# Altium schematic symbol library Reles.SchLib: 4 symbols
Pins are listed as number, name and electrical type; pins without a type are passive.

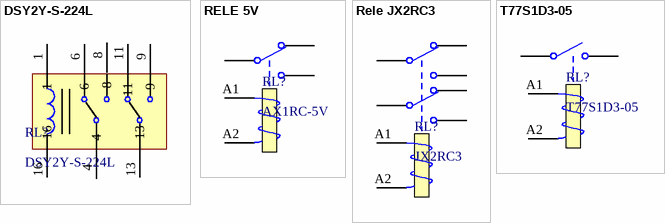
[diagram p0: symbols DSY2Y-S-224L to T77S1D3-05]

## DSY2Y-S-224L
designator RL?
footprint DSY2Y-S-224L (Relé pequeno 24V)
pins: 1, 4, 6, 8, 9, 11, 13, 16

## RELE 5V
designator RL?, comment AX1RC-5V
AX1RC-5V Metaltex
footprint AX1RC
pins: A1, A2, C, NA, NF

## Rele JX2RC3
designator RL?, comment JX2RC3
Rele 24VDC 5A DPDT Metaltex
footprint JX2RC3 24V (Relay Metaltex JX2RC3 24VDC Coil)
pins: A1, A2, C1, C2, NA1, NA2, NF1, NF2

## T77S1D3-05
designator RL?
General Purpose Relay 1-NO 5VDC Coil
footprint T77S1D3
pins: A1, A2, C, NA